# Altium footprint library Connectors.PcbLib: 54 footprints (part 4 of 4)
Each footprint in its own frame and in the unit in brackets; x right, y up, seen from the top. Pads: shape width x height; smd on the part's side, far side on the other; paste and mask are expansions set on the pad; w line width, h text height; cw(c..) or ccw(c..) is an arc to the next point about the centre after c.
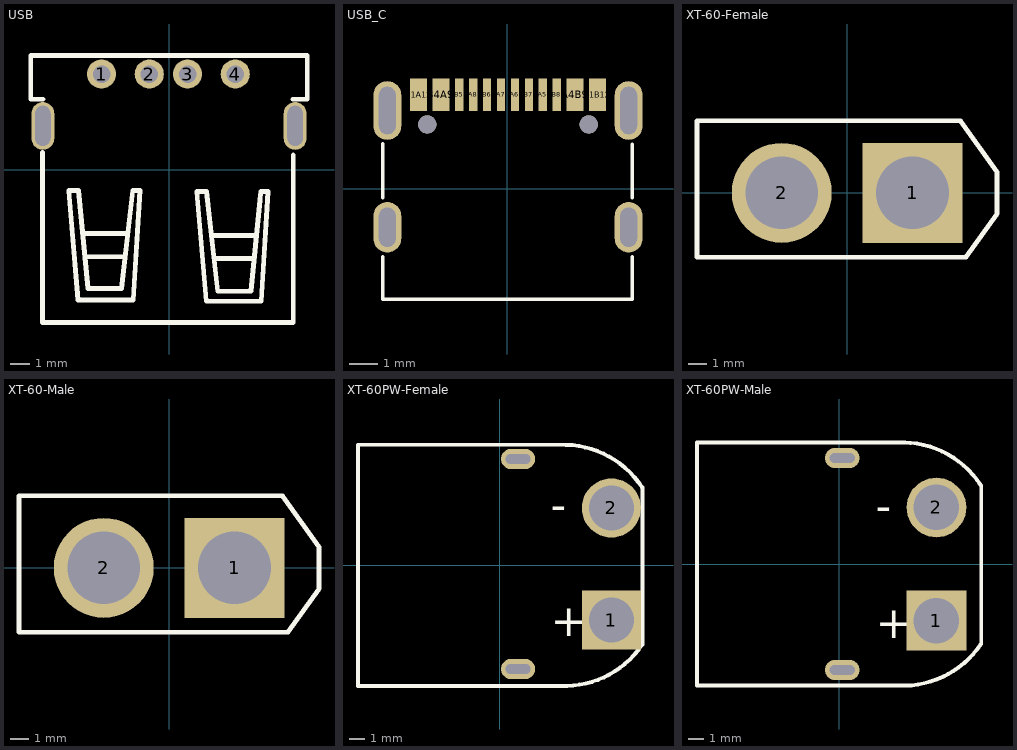
[diagram p3: the footprints below, top view; thin cyan lines are the x and y axes]

## USB [mil]
pads (6):
  round 60 hole 36 paste-99999 mask+2: 1(-139,196.91) 2(-40.6,196.91) 3(38.2,196.91) 4(136.59,196.91)
  oval 47.24x98.43 hole 31.5 slot 82.68 at 90 deg paste-99999 mask+2: ""(-260,90) ""(260,90)
Top Overlay:
  lines w10: -261.05,35 -261.05,-315 256.02,-315 256.02,30 ; -260,145 -285,145 -285,235 285,235 285,145 255,145 ; -175.87,-131.91 -86.89,-131.91 ; -170.35,-179.55 -90.44,-179.55 ; 90.05,-135.81 179.03,-135.81 ; 95.56,-183.45 175.47,-183.45 ; -206.79,-42.73 -186.79,-42.73 -166.91,-244.9 -98,-244.9 -74.8,-42.73 -59.8,-42.73 -73.8,-268.73 -187.79,-268.73 -206.79,-42.73 ; 57.27,-45.31 77.31,-45.46 97.39,-224.21 100.36,-250.91 169.25,-250.49 187.91,-62.37 189.09,-45.44 204.06,-45.44 190.28,-271.54 76.77,-271.1 57.27,-45.31
3D body "USB.SLDPRT": height 301.18, standoff -147.15, extent -309.06,-317.09 309.06,240

## USB_C [mm]
pads (18):
  rect 0.6x1.15 smd: A1B12(3.22,3.364) A4B9(2.42,3.364) B1A12(-3.18,3.364) B4A9(-2.38,3.364)
  rect 0.3x1.15 smd: A5(1.27,3.364) A6(0.27,3.364) A7(-0.23,3.364) A8(-1.23,3.364) B5(-1.73,3.364) B6(-0.73,3.364) B7(0.77,3.364) B8(1.77,3.364)
  oval 1x1.8 hole 0.6 slot 1.4 at 90 deg: ""(-4.3,-1.381) ""(4.34,-1.381)
  oval 1x2.1 hole 0.6 slot 1.7 at 90 deg: ""(-4.3,2.799) ""(4.34,2.799)
  round 0.65 hole 0.65 unplated: ""(-2.87,2.298) ""(2.91,2.298)
Top Overlay:
  lines w0.125: -4.465,-2.436 -4.465,-3.962 4.465,-3.962 4.465,-2.436 ; -4.465,-0.316 -4.465,1.604 ; 4.465,-0.327 4.465,1.594
Bottom Paste:
  region: 1.92,3.939 1.62,3.939 1.62,2.789 1.92,2.789
  region: 1.42,3.939 1.12,3.939 1.12,2.789 1.42,2.789
  region: 0.92,3.939 0.62,3.939 0.62,2.789 0.92,2.789
  region: 0.42,3.939 0.12,3.939 0.12,2.789 0.42,2.789
  region: -0.08,3.939 -0.38,3.939 -0.38,2.789 -0.08,2.789
  region: -0.58,3.939 -0.88,3.939 -0.88,2.789 -0.58,2.789
  region: -1.08,3.939 -1.38,3.939 -1.38,2.789 -1.08,2.789
  region: -1.58,3.939 -1.88,3.939 -1.88,2.789 -1.58,2.789
  region: 2.72,3.939 2.12,3.939 2.12,2.789 2.72,2.789
  region: 3.52,3.939 2.92,3.939 2.92,2.789 3.52,2.789
  region: -2.08,3.939 -2.68,3.939 -2.68,2.789 -2.08,2.789
  region: -2.88,3.939 -3.48,3.939 -3.48,2.789 -2.88,2.789
  region: 4.84,3.349 4.84,3.448 4.764,3.632 4.624,3.773 4.44,3.849 4.241,3.849 4.057,3.773 3.916,3.632 3.84,3.448 3.84,3.349 3.84,2.249 3.84,2.149 3.916,1.965 4.057,1.825 4.241,1.749 4.44,1.749 4.624,1.825 4.764,1.965 4.84,2.149 4.84,2.249
  region: -3.8,3.349 -3.8,3.448 -3.876,3.632 -4.017,3.773 -4.2,3.849 -4.399,3.849 -4.583,3.773 -4.724,3.632 -4.8,3.448 -4.8,3.349 -4.8,2.249 -4.8,2.149 -4.724,1.965 -4.583,1.825 -4.399,1.749 -4.2,1.749 -4.017,1.825 -3.876,1.965 -3.8,2.149 -3.8,2.249
  region: 4.84,-0.981 4.84,-0.882 4.764,-0.698 4.624,-0.558 4.44,-0.481 4.241,-0.481 4.057,-0.558 3.916,-0.698 3.84,-0.882 3.84,-0.981 3.84,-1.781 3.84,-1.881 3.916,-2.065 4.057,-2.205 4.241,-2.281 4.44,-2.281 4.624,-2.205 4.764,-2.065 4.84,-1.881 4.84,-1.781
  region: -3.8,-0.981 -3.8,-0.882 -3.876,-0.698 -4.017,-0.558 -4.2,-0.481 -4.399,-0.481 -4.583,-0.558 -4.724,-0.698 -4.8,-0.882 -4.8,-0.981 -4.8,-1.781 -4.8,-1.881 -4.724,-2.065 -4.583,-2.205 -4.399,-2.281 -4.2,-2.281 -4.017,-2.205 -3.876,-2.065 -3.8,-1.881 -3.8,-1.781
3D body "USB_C.STEP": height 3.26, standoff -1, extent -4.49,-3.999 4.45,3.751

## XT-60-Female [mil]
pads (2):
  rect 216.5x216.5 hole 157.48: 1(141.73,0)
  round 216.5 hole 157.48: 2(-141.73,0)
Top Overlay:
  lines w10: -325.28,-139.13 257.76,-139.13 324.72,-45.38 324.72,45.39 245.81,155.87 -325.28,155.87 -325.28,-139.13
3D body "XT60Female.x_t": height 629.92, standoff -177.17, extent -323.98,-141.77 327.6,153.5

## XT-60-Male [mil]
pads (2):
  rect 216.5x216.5 hole 157.48: 1(141.73,0)
  round 216.5 hole 157.48: 2(-141.73,0)
Top Overlay:
  lines w10: -325.28,-139.13 257.76,-139.13 324.72,-45.38 324.72,45.39 245.81,155.87 -325.28,155.87 -325.28,-139.13
3D body "XT60Male.x_t": height 618.11, standoff -177.17, extent -323.98,-141.77 327.6,153.5

## XT-60PW-Female [mm]
pads (4):
  rect 3.8x3.8 hole 2.9 paste-2539.97 mask+0.05: 1(7.184,-3.515)
  round 3.8 hole 2.9 paste-2539.97 mask+0.05: 2(7.184,3.685)
  oval 2.2x1.3 hole 0.6 slot 1.6 at 0 deg paste-2539.97 mask+0.05: ""(1.184,-6.665) ""(1.184,6.835)
Top Overlay:
  lines w0.254: 4.262,7.747 cw(c4.119,1.749) 9.151,5.017 ; 4.325,7.75 -9.103,7.75 -9.103,-7.75 4.325,-7.75 ccw(c4.182,-1.752) 9.156,-5.107 ; 9.179,5.017 9.179,-5.107
  text "-" at 3.295,2.905 h2.03
  text "+" at 3.295,-4.546 h2.03
3D body "XT60PW-F.SLDPRT": height 8.65, standoff -1.45, extent -9.215,-7.665 9.185,7.835

## XT-60PW-Male [mm]
pads (4):
  rect 3.8x3.8 hole 2.9 paste-2539.97 mask+0.05: 1(6.207,-3.6)
  round 3.8 hole 2.9 paste-2539.97 mask+0.05: 2(6.207,3.6)
  oval 2.2x1.3 hole 0.6 slot 1.6 at 0 deg paste-2539.97 mask+0.05: ""(0.207,-6.75) ""(0.207,6.75)
Top Overlay:
  lines w0.254: 4.144,7.747 cw(c4.001,1.749) 9.033,5.017 ; 4.207,7.75 -9.046,7.75 -9.046,-7.75 4.207,-7.75 ccw(c4.064,-1.752) 9.038,-5.107 ; 9.061,-5.107 9.061,5.017
  text "+" at 2.333,-4.715 h2.03
  text "-" at 2.333,2.736 h2.03
3D body "XT60PW-M.SLDPRT": height 8.9, standoff -1.5, extent -9.129,-7.754 9.071,7.746